# Altium footprint library Connectors.PcbLib: 113 footprints (part 8 of 8)
Each footprint in its own frame and in the unit in brackets; x right, y up, seen from the top. Pads: shape width x height; smd on the part's side, far side on the other; paste and mask are expansions set on the pad; w line width, h text height; cw(c..) or ccw(c..) is an arc to the next point about the centre after c.
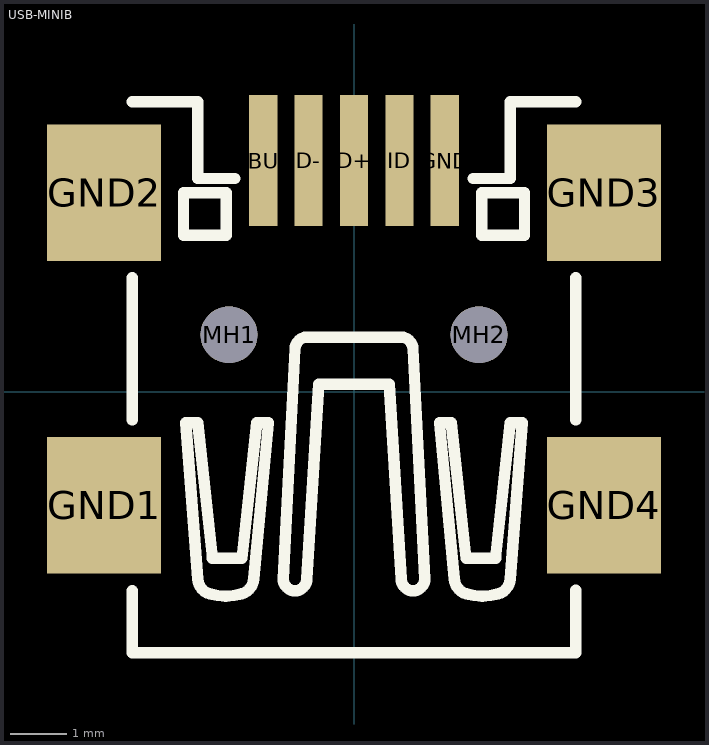
[diagram p7: the footprint, top view; thin cyan lines are the x and y axes]

## USB-MINIB [mm]
pads (11):
  rect 0.5x2.308 smd: D+(0,4.064) D-(-0.8,4.064) GND(1.6,4.064) ID(0.8,4.064) VBUS(-1.6,4.064)
  rect 2x2.4 smd: GND1(-4.4,-2) GND2(-4.4,3.5) GND3(4.4,3.5) GND4(4.4,-2)
  round 1 hole 1 unplated: MH1(-2.2,1) MH2(2.2,1)
Top Overlay:
  lines w0.2: -3.9,-3.506 -3.9,-4.6 3.9,-4.6 3.9,-3.5 ; -3.9,-0.5 -3.9,2 ; -3.9,5.1 -2.751,5.1 ; -2.75,5.1 -2.75,3.75 -2.1,3.75 ; -1.038,-3.506 cw(c-1.038,-3.299) -1.246,-3.298 -1.038,0.751 cw(c-0.819,0.739) -0.831,0.958 0.83,0.958 cw(c0.818,0.739) 1.038,0.751 1.246,-3.298 cw(c1.038,-3.299) 1.038,-3.506 cw(c1.038,-3.298) 0.83,-3.298 0.623,0.128 -0.623,0.128 -0.831,-3.298 cw(c-1.038,-3.299) -1.038,-3.506 ; 2.1,3.75 2.75,3.75 2.75,5.1 ; 2.751,5.1 3.9,5.1 ; 3.9,-0.5 3.9,2 ; -3,2.75 -3,3.5 -2.25,3.5 -2.25,2.75 -3,2.75 ; -2.959,-0.547 -2.751,-0.547 -2.492,-2.935 -1.973,-2.935 -1.713,-0.547 -1.505,-0.547 -1.765,-3.298 cw(c-2.059,-3.276) -1.973,-3.558 cw(c-2.258,-2.627) -2.544,-3.558 cw(c-2.457,-3.276) -2.751,-3.298 -2.959,-0.547 ; 1.505,-0.547 1.713,-0.547 1.973,-2.935 2.492,-2.935 2.751,-0.547 2.959,-0.547 2.751,-3.298 cw(c2.457,-3.276) 2.544,-3.558 cw(c2.258,-2.627) 1.973,-3.558 cw(c2.059,-3.276) 1.765,-3.298 1.505,-0.547 ; 2.25,2.75 3,2.75 3,3.5 2.25,3.5 2.25,2.75